# Altium footprint library Robot.PcbLib: 113 footprints (part 2 of 8)
Each footprint in its own frame and in the unit in brackets; x right, y up, seen from the top. Pads: shape width x height; smd on the part's side, far side on the other; paste and mask are expansions set on the pad; w line width, h text height; cw(c..) or ccw(c..) is an arc to the next point about the centre after c.
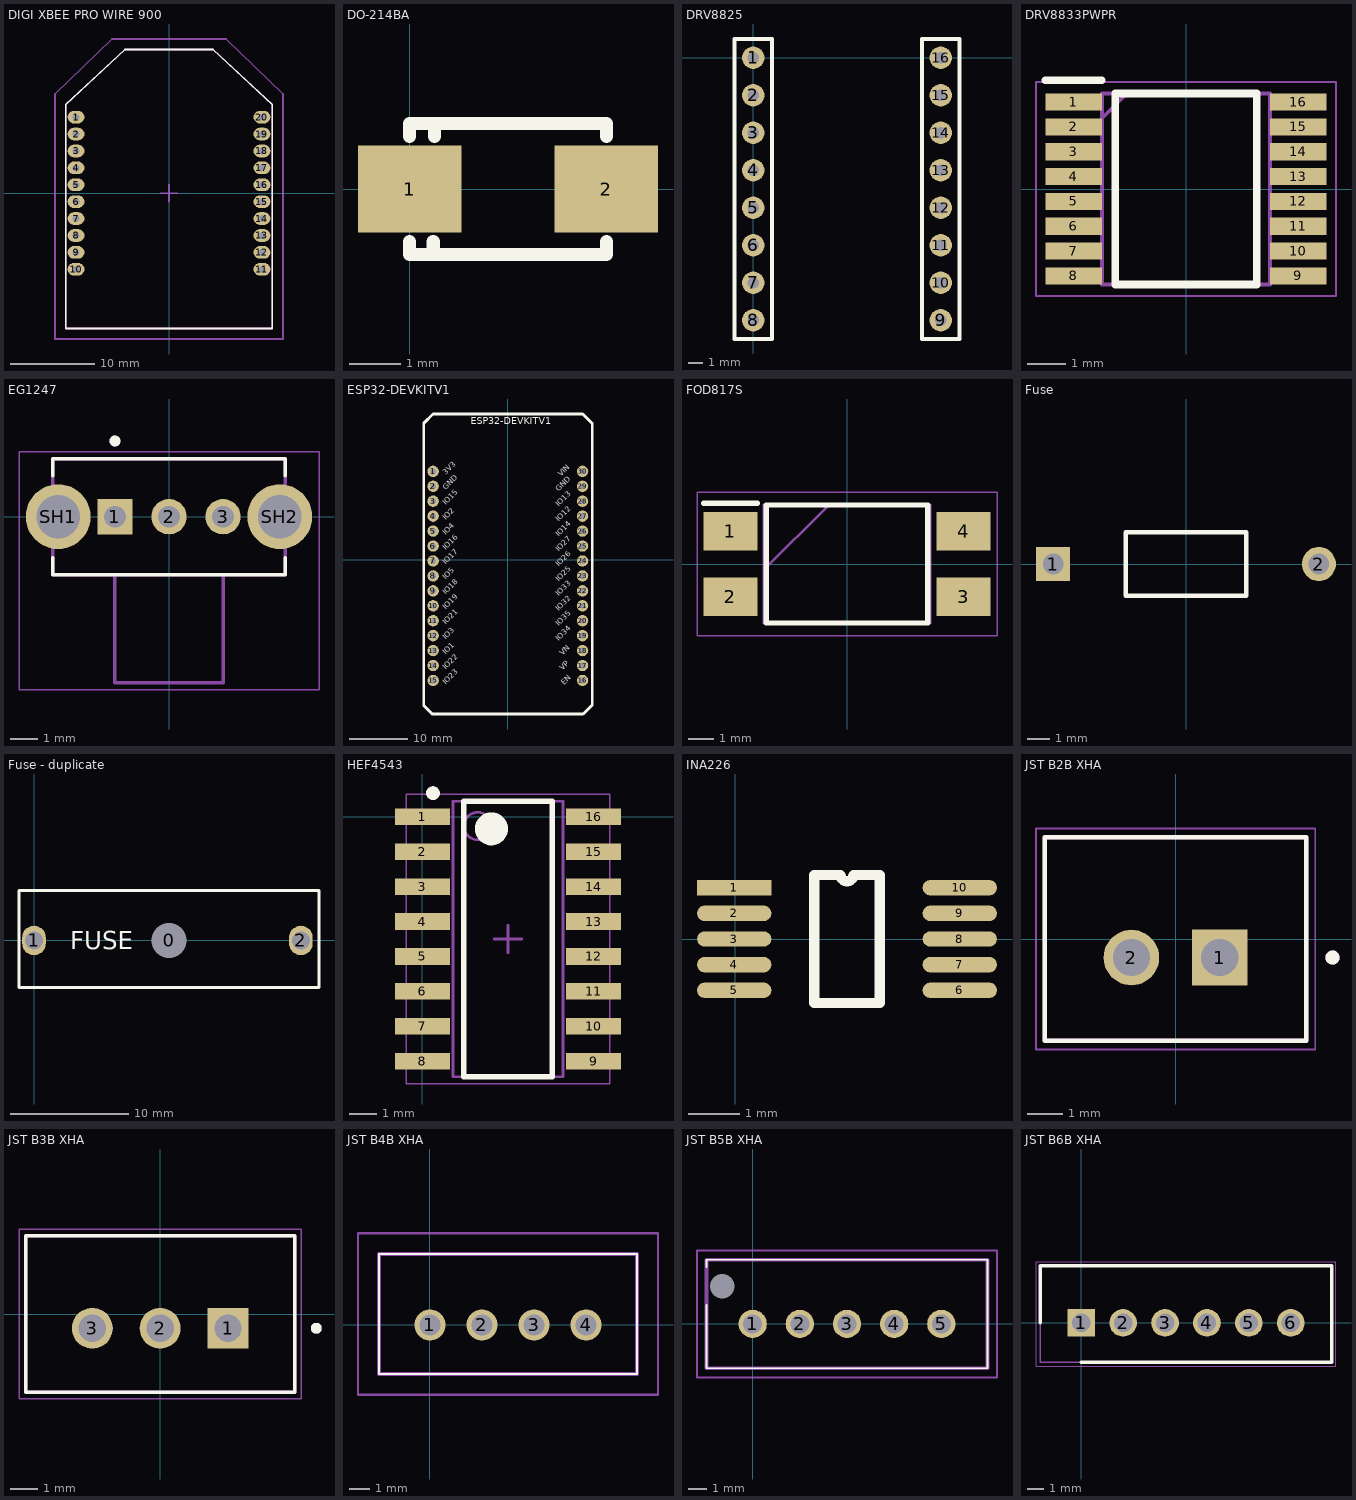
[diagram p1: the footprints below, top view; thin cyan lines are the x and y axes]

## DIGI XBEE PRO WIRE 900 [mm]
height 4
pads (20):
  oval 2x1.5 hole 0.8: 1(-11,9) 2(-11,7) 3(-11,5) 4(-11,3) 5(-11,1) 6(-11,-1) 7(-11,-3) 8(-11,-5) 9(-11,-7) 10(-11,-9) 11(11,-9) 12(11,-7) 13(11,-5) 14(11,-3) 15(11,-1) 16(11,1) 17(11,3) 18(11,5) 19(11,7) 20(11,9)
Top Overlay:
  lines w0.2: -12.2,-16 12.2,-16 12.2,10.5 5.2,17 0,17 -5.2,17 -12.2,10.5 -12.2,-16
Mechanical 1:
  lines w0.2: -12.2,-16 -12.2,10.5 -5.2,17 0,17 5.2,17 12.2,10.5 12.2,-16 -12.2,-16
Mechanical 15:
  lines w0.2: -1,0 1,0 ; 0,-1 0,1 ; -13.5,-17.25 -13.5,11.75 -6.75,18.25 6.75,18.25 13.5,11.75 13.5,-17.25 -13.5,-17.25
3D body "XBee Pro Wire 900.STEP": height 77.88, standoff -4.17, extent -12.192,-15.97 12.192,16.97

## DO-214BA [mm] "DO-214BA (GF1)"
pads (2):
  rect 2x1.68 smd: 1(0,0) 2(3.81,0)
Top Overlay:
  lines w0.254: 0,-1.016 0,-1.27 3.81,-1.27 3.81,-1.016 ; 0,1.016 0,1.27 3.81,1.27 3.81,1.016 ; 0.457,-1.27 0.457,-1.016 ; 0.483,1.016 0.483,1.27
3D body "diode_172mil_chip1210.STEP": height 2.35, standoff 0.01, extent -0.545,-1.33 4.3,1.335

## DRV8825 [mil] "Stepper Driver"
pads (16):
  round 60 hole 31.5: 1(0,0) 2(0,-100) 3(0,-200) 4(0,-300) 5(0,-400) 6(0,-500) 7(0,-600) 8(0,-700) 9(500,-700) 10(500,-600) 11(500,-500) 12(500,-400) 13(500,-300) 14(500,-200) 15(500,-100) 16(500,0)
Top Overlay:
  lines w10: -50,-750 -50,50 50,50 50,-750 -50,-750 ; 450,-750 450,50 550,50 550,-750 450,-750
3D body "DRV8825_2.STEP": height 445.74, standoff 16.6, extent -45.72,-763.84 544.83,62.93
3D body: height 236.22, standoff 0, extent 450,-750 550,50
3D body: height 236.22, standoff 0, extent -50,-750 50,50

## DRV8833PWPR [mm] "Motor driver"
pads (16):
  rect 1.475x0.45 smd: 1(-2.938,2.275) 2(-2.938,1.625) 3(-2.938,0.975) 4(-2.938,0.325) 5(-2.938,-0.325) 6(-2.938,-0.975) 7(-2.938,-1.625) 8(-2.938,-2.275) 9(2.938,-2.275) 10(2.938,-1.625) 11(2.938,-0.975) 12(2.938,-0.325) 13(2.938,0.325) 14(2.938,0.975) 15(2.938,1.625) 16(2.938,2.275)
Top Overlay:
  lines w0.2: -3.675,2.85 -2.2,2.85 ; -1.85,-2.5 1.85,-2.5 1.85,2.5 -1.85,2.5 -1.85,-2.5
Mechanical 13:
  lines w0.1: -2.2,1.85 -1.55,2.5 ; -2.2,-2.5 2.2,-2.5 2.2,2.5 -2.2,2.5 -2.2,-2.5
Mechanical 15:
  lines w0.05: -3.925,-2.8 3.925,-2.8 3.925,2.8 -3.925,2.8 -3.925,-2.8
3D body "DRV8833PWPR.stp": height 1.13, standoff 0, extent -3.2,-2.5 3.2,2.5

## EG1247 [mm] "Slide Switch SPDT Through Hole, Right Angle"
height 4.7
pads (5):
  rect 1.308x1.308 / inner round 1.308 / far side rect 1.308x1.308 hole 0.8: 1(-2,0)
  round 1.308 hole 0.8: 2(0,0) 3(2,0)
  round 2.4 hole 1.6: SH1(-4.1,0) SH2(4.1,0)
Top Overlay:
  circle w0.2: c-2,2.8 r0.1
  lines w0.127: -4.3,-1.52 -4.3,-2.15 4.3,-2.15 4.3,-1.52 ; -4.3,1.52 -4.3,2.15 4.3,2.15 4.3,1.52
Mechanical 13:
  circle w0.2: c-2,2.8 r0.1
  lines w0.127: -2,-2.15 -4.3,-2.15 -4.3,2.15 4.3,2.15 4.3,-2.15 2,-2.15 ; -2,-2.15 2,-2.15 ; -2,-2.15 -2,-6.15 2,-6.15 2,-2.15
Mechanical 15:
  lines w0.05: -5.55,-6.4 -5.55,2.4 5.55,2.4 5.55,-6.4 -5.55,-6.4
3D body "step_temp.STEP": height 4.7, standoff -2.8, extent -4.3,-6.15 4.3,2.15

## ESP32-DEVKITV1 [mil]
pads (30):
  round 76 / inner round 60 / far side round 76 hole 39.37: 1(-500,590.55) 2(-500,490.55) 3(-500,390.55) 4(-500,290.55) 5(-500,190.55) 6(-500,90.55) 7(-500,-9.45) 8(-500,-109.45) 9(-500,-209.45) 10(-500,-309.45) 11(-500,-409.45) 12(-500,-509.45) 13(-500,-609.45) 14(-500,-709.45) 15(-500,-809.45) 16(500,-809.45) 17(500,-709.45) 18(500,-609.45) 19(500,-509.45) 20(500,-409.45) 21(500,-309.45) 22(500,-209.45) 23(500,-109.45) 24(500,-9.45) 25(500,90.55) 26(500,190.55) 27(500,290.55) 28(500,390.55) 29(500,490.55) 30(500,590.55)
Top Overlay:
  lines w19.68: -563.39,-976.77 -563.39,911.81 -500.79,974.41 500.79,974.41 564.96,910.24 564.96,-972.83 503.94,-1033.86 -506.3,-1033.86 -563.39,-976.77
  text "ESP32-DEVKITV1" at -247.64,888.58 h77.5
  text "3V3" at -406.69,553.55 h62
  text "GND" at -406.69,453.55 h62
  text "IO15" at -406.69,353.55 h62
  text "IO2" at -406.69,253.55 h62
  text "IO4" at -406.69,153.55 h62
  text "IO16" at -406.69,53.55 h62
  text "IO17" at -406.69,-46.45 h62
  text "IO5" at -406.69,-146.45 h62
  text "IO18" at -406.69,-246.45 h62
  text "IO19" at -406.69,-346.45 h62
  text "IO21" at -406.69,-446.45 h62
  text "IO3" at -406.69,-546.45 h62
  text "IO1" at -406.69,-646.45 h62
  text "IO22" at -406.69,-746.45 h62
  text "IO23" at -406.69,-846.45 h62
  text "VIN" at 368.9,543.31 h62
  text "GND" at 349.6,442.92 h62
  text "IO13" at 349.6,342.92 h62
  text "IO12" at 349.6,242.91 h62
  text "IO14" at 349.6,142.91 h62
  text "IO27" at 349.6,42.91 h62
  text "IO26" at 349.6,-57.09 h62
  text "IO25" at 349.6,-157.09 h62
  text "IO33" at 349.6,-257.08 h62
  text "IO32" at 349.6,-357.08 h62
  text "IO35" at 349.6,-457.08 h62
  text "IO34" at 349.6,-557.09 h62
  text "VN" at 377.95,-652.75 h62
  text "VP" at 377.95,-752.75 h62
  text "EN" at 387.8,-850 h62
3D body "ESP-32_v1.STEP": height 283.46, standoff -204.72, extent -559.84,-1027.17 562.21,977.95

## FOD817S [mm] "Optocoupleur"
pads (4):
  rect 2.1x1.5 smd: 1(-4.55,1.27) 2(-4.55,-1.27) 3(4.55,-1.27) 4(4.55,1.27)
Top Overlay:
  lines w0.2: -5.6,2.37 -3.5,2.37 ; -3.15,-2.3 3.15,-2.3 3.15,2.3 -3.15,2.3 -3.15,-2.3
Mechanical 13:
  lines w0.1: -3.25,-0.24 -0.71,2.3 ; -3.25,-2.3 3.25,-2.3 3.25,2.3 -3.25,2.3 -3.25,-2.3
Mechanical 15:
  lines w0.05: -5.85,-2.8 5.85,-2.8 5.85,2.8 -5.85,2.8 -5.85,-2.8
3D body "SO4.stp": height 2.21, standoff 0.01, extent -3.53,-1.397 3.479,1.443

## Fuse [mm] "Thru-Hole; 2 Leads"
pads (2):
  rect 1.5x1.5 hole 0.9: 1(-5.825,0)
  round 1.5 hole 0.9: 2(5.825,0)
Top Overlay:
  lines w0.2: -2.65,-1.4 -2.65,1.4 2.65,1.4 2.65,-1.4 -2.65,-1.4

## Fuse - duplicate [mm] "Porte-fusible monté sur circuit 10 (UL) A, 6.3 (VDE) A, fusible Cartouche, 893-0574"
height 13.5
pads (3):
  round 2 hole 3: 0(11.43,0)
  oval 2x2.5 hole 1.5: 1(0,0) 2(22.6,0)
Top Overlay:
  lines w0.254: -1.27,-4 -1.27,4.25 24.13,4.25 24.13,-4 -1.27,-4
  text "FUSE" at 3.048,-0.762 h1.52
3D body "FuseHolder.stp": height 11.41, standoff -3.54, extent 16.002,-4.286 24.13,4.064
3D body "FuseHolder.stp": height 11.41, standoff -3.54, extent -1.27,-4.064 6.858,4.286
3D body: height 10, standoff 4, extent 0.43,-3.048 22.43,2.952

## HEF4543 [mm] "SOP, 16-Leads, Body 9,90x3,90mm, Pitch 1,27mm, IPC Medium Density"
height 1.75
pads (16):
  rect 2x0.6 smd: 1(0,0) 2(0,-1.27) 3(0,-2.54) 4(0,-3.81) 5(0,-5.08) 6(0,-6.35) 7(0,-7.62) 8(0,-8.89) 9(6.212,-8.89) 10(6.212,-7.62) 11(6.212,-6.35) 12(6.212,-5.08) 13(6.212,-3.81) 14(6.212,-2.54) 15(6.212,-1.27) 16(6.212,0)
Top Overlay:
  circle w0.6: c2.506,-0.445 r0.3
  circle w0.25: c0.381,0.85 r0.125
  lines w0.2: 1.506,-9.445 4.706,-9.445 4.706,0.555 1.506,0.555 1.506,-9.445
Mechanical 13:
  circle w0.1: c2.006,-0.345 r0.5
  lines w0.1: 1.106,-9.445 5.106,-9.445 5.106,0.555 1.106,0.555 1.106,-9.445
Mechanical 15:
  lines w0.05: -0.594,-9.695 6.806,-9.695 6.806,0.805 -0.594,0.805 -0.594,-9.695
  lines w0.1: 2.606,-4.445 3.606,-4.445 ; 3.106,-4.945 3.106,-3.945
3D body: height 1.75, standoff 0.25, extent 1.106,-9.445 5.106,0.555

## INA226 [mm]
pads (10):
  rect 1.45x0.3 smd: 1(-0.025,1)
  oval 1.45x0.3 smd: 2(-0.025,0.5) 3(-0.025,0) 4(-0.025,-0.5) 5(-0.025,-1) 6(4.375,-1) 7(4.375,-0.5) 8(4.375,0) 9(4.375,0.5) 10(4.375,1)
Top Overlay:
  lines w0.2: 1.535,-1.25 2.815,-1.25 2.815,1.25 2.3,1.25 cw(c2.175,1.25) 2.05,1.25 1.535,1.25 1.535,-1.25

## JST B2B XHA [mm]
height 7
pads (2):
  rect 1.575x1.575 / inner round 1.575 / far side rect 1.575x1.575 hole 1.05: 1(1.25,-0.525)
  round 1.575 hole 1.05: 2(-1.25,-0.525)
Top Overlay:
  circle w0.2: c4.44,-0.525 r0.1
  lines w0.127: -3.7,-2.875 -3.7,2.875 3.7,2.875 3.7,-2.875 -3.7,-2.875
Mechanical 13:
  circle w0.2: c4.44,-0.525 r0.1
  lines w0.127: -3.7,-2.875 -3.7,2.875 3.7,2.875 3.7,-2.875 -3.7,-2.875
Mechanical 15:
  lines w0.05: -3.95,-3.125 3.95,-3.125 3.95,3.125 -3.95,3.125 -3.95,-3.125
3D body "step_temp.STEP": height 7, standoff -3.4, extent -3.7,-2.875 3.7,2.875

## JST B3B XHA [mm]
height 7
pads (3):
  rect 1.508x1.508 / inner round 1.508 / far side rect 1.508x1.508 hole 1: 1(2.5,-0.525)
  round 1.508 hole 1: 2(0,-0.525) 3(-2.5,-0.525)
Top Overlay:
  circle w0.2: c5.75,-0.525 r0.1
  lines w0.127: -4.95,-2.875 4.95,-2.875 4.95,2.875 -4.95,2.875 -4.95,-2.875
Mechanical 13:
  circle w0.2: c5.75,-0.525 r0.1
  lines w0.127: -4.95,-2.875 4.95,-2.875 4.95,2.875 -4.95,2.875 -4.95,-2.875
Mechanical 15:
  lines w0.05: -5.2,-3.125 5.2,-3.125 5.2,3.125 -5.2,3.125 -5.2,-3.125
3D body "step_temp.STEP": height 7, standoff -3.4, extent -4.95,-2.875 4.95,2.875

## JST B4B XHA [mm] "Connecteur 4"
pads (4):
  round 1.5 hole 1: 1(0,0) 2(2.5,0) 3(5,0) 4(7.5,0)
Top Overlay:
  lines w0.1: -2.45,-2.35 9.95,-2.35 9.95,3.4 -2.45,3.4 -2.45,-2.35
Mechanical 13:
  lines w0.2: -2.45,-2.35 9.95,-2.35 9.95,3.4 -2.45,3.4 -2.45,-2.35
Mechanical 15:
  lines w0.1: -3.45,-3.35 10.95,-3.35 10.95,4.4 -3.45,4.4 -3.45,-3.35
3D body "B4B-XH-A_LF__SN_.stp": height 7.52, standoff -2.88, extent -2.454,-2.355 9.946,3.395

## JST B5B XHA [mm] "Connecteur 5"
pads (6):
  round 1.5 hole 1: 1(0,0) 2(2.5,0) 3(5,0) 4(7.5,0) 5(10,0)
  round 0.65 hole 1.3 unplated: MH1(-1.6,2)
Top Overlay:
  lines w0.1: -2.45,1 -2.45,-2.35 12.45,-2.35 12.45,3.4 -2.45,3.4 -2.45,3
Mechanical 13:
  lines w0.2: -2.45,-2.35 -2.45,3.4 12.45,3.4 12.45,-2.35 -2.45,-2.35
Mechanical 15:
  lines w0.1: -2.95,-2.85 -2.95,3.9 12.95,3.9 12.95,-2.85 -2.95,-2.85
3D body "B5B-XH-AM__LF__SN_.stp": height 6.92, standoff -3.48, extent -2.45,-2.355 12.45,3.395

## JST B6B XHA [mm]
pads (6):
  rect 1.65x1.65 hole 1.1: 1(0,0)
  round 1.65 hole 1.1: 2(2.5,0) 3(5,0) 4(7.5,0) 5(10,0) 6(12.5,0)
Top Overlay:
  lines w0.2: -2.45,0 -2.45,3.4 14.95,3.4 14.95,-2.35 0,-2.35
Mechanical 13:
  lines w0.1: -2.45,-2.35 14.95,-2.35 14.95,3.4 -2.45,3.4 -2.45,-2.35
Mechanical 15:
  lines w0.05: -2.7,-2.6 15.2,-2.6 15.2,3.65 -2.7,3.65 -2.7,-2.6
3D body "B6B-XH-A_LF__SN_.stp": height 7, standoff -3.4, extent -2.45,-2.875 14.95,2.875